# Altium schematic symbol library Resistor.SchLib: 1085 symbols (part 8 of 29)
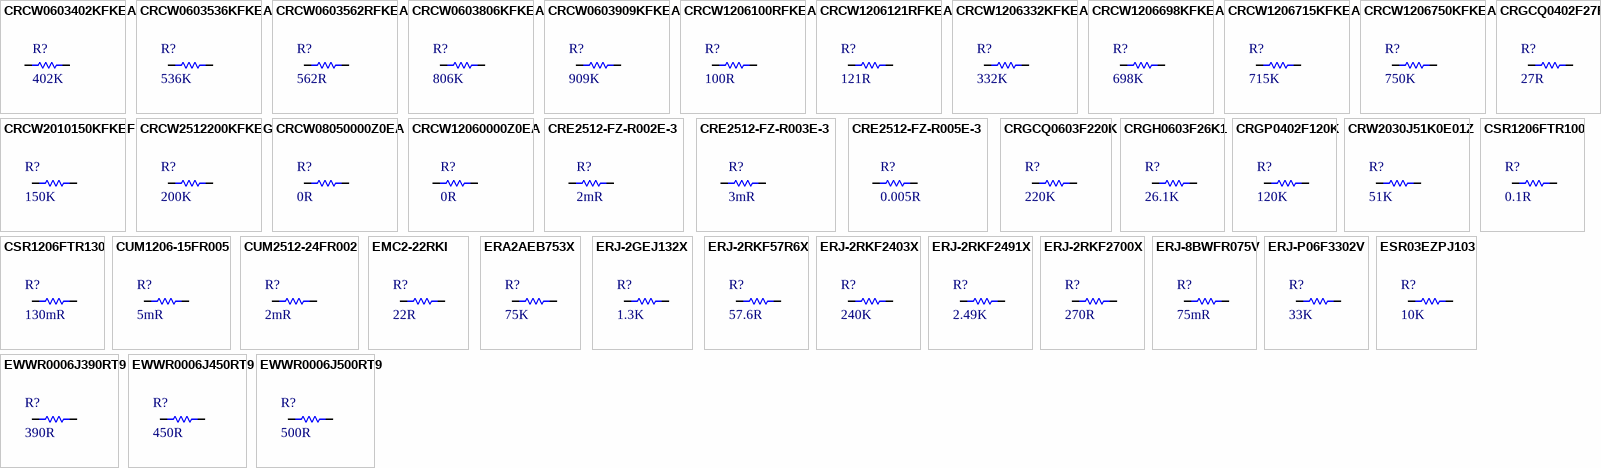
[diagram p34: symbols CRCW0603402KFKEA to EWWR0006J500RT9]

## CRCW2512200KFKEG
designator R?, comment 200K
RES SMD 200K OHM 1% 1W 2512; Manufacturer: Vishay Dale; Manufacturer Part Number: CRCW2512200KFKEG; Item Type: Resistors; Voltage Rating (DC): 500V; Supplier: Mouser; LCSC Part Number: C2078538; RoHS: Yes; Stock: 29311; Pricing: 1=0.3, 10=0.127, 50=0.127, 100=0.082, 1000=0.067, 10000=0.047 (USD); Lead Free: 5697LeadFree; ComponentLink1URL: https://datasheet.ciiva.com/16435/dcrcwe3-16435690.pdf?src-supplier=Future+Electronics; ComponentLink1Description: https://datasheet.ciiva.com/16435/dcrcwe3-16435690.pdf?src-supplier=Future+Electronics; ComponentLink2URL: https://datasheet.ciiva.com/5545/dcrcwe3-109170-5545692.pdf?src-supplier=Mouser; ComponentLink2Description: https://datasheet.ciiva.com/5545/dcrcwe3-109170-5545692.pdf?src-supplier=Mouser
footprint RES-2512
pins: 1, 2

## CRCW08050000Z0EA
designator R?, comment 0R
RES SMD 0 OHM JUMPER 1/8W 0805; Manufacturer: Vishay; Manufacturer Part Number: CRCW08050000Z0EA; Item Type: Resistors; Value: 0mR; Power Rating: 125mW; Voltage Rating: 150V; Tolerance: 1%; Temperature Coefficient: 100ppm/°C; Supplier: Mouser; LCSC Part Number: C844934; RoHS: Yes; Stock: 1461054; Pricing: 1=0.1, 10=0.023, 50=0.023, 100=0.014, 1000=0.012, 10000=0.005 (USD); Case/Package: 0805; Contact Plating: Tin; Weight: 0.000194oz; Case Code (Imperial): 0805; Case Code (Metric): 2012; Min Operating Temperature: -55°C; Max Operating Temperature: 155°C; Resistor Type: Thick Film; Packaging: Tape and Reel; Package Quantity: 1; Termination: SMD/SMT; Number of Terminations: 2; Max Power Dissipation: 125mW; Features: Automotive AEC-Q200; Series: CRCW; Construction: Rectangular; Technology: THICK FILM; Voltage Rating (DC): 150V; Resistance Tolerance: 1%; Length: 2mm; Width: 0.049inch; Height: 0.45mm; Depth: 1.25mm; Radiation Hardening: No; Lead Free: 5697LeadFree; RoHS Compliant: Yes; Military Standard: Not; Reach SVHC Compliant: Unknown; ComponentLink1URL: https://datasheet.ciiva.com/11811/0900766b80d98b26-11811304.pdf?src-supplier=Rs; ComponentLink1Description: https://datasheet.ciiva.com/11811/0900766b80d98b26-11811304.pdf?src-supplier=Rs; ComponentLink2URL: https://datasheet.ciiva.com/7841/1720486-7841839.pdf?src-supplier=Element14; ComponentLink2Description: https://datasheet.ciiva.com/7841/1720486-7841839.pdf?src-supplier=Element14; ComponentLink3URL: https://datasheet.ciiva.com/26314/fld-crcw-e3-data-en-26314630.pdf?src-supplier=Distrelec; ComponentLink3Description: https://datasheet.ciiva.com/26314/fld-crcw-e3-data-en-26314630.pdf?src-supplier=Distrelec; ComponentLink4URL: https://datasheet.ciiva.com/7841/1697337-7841629.pdf?src-supplier=Element14; ComponentLink4Description: https://datasheet.ciiva.com/7841/1697337-7841629.pdf?src-supplier=Element14; ComponentLink5URL: https://datasheet.ciiva.com/2463/dcrcwe3-2463038.pdf?src-supplier=Digikey; ComponentLink5Description: https://datasheet.ciiva.com/2463/dcrcwe3-2463038.pdf?src-supplier=Digikey; ComponentLink6URL: https://datasheet.ciiva.com/2463/dcrcwe3-2463039.pdf?src-supplier=Digikey; ComponentLink6Description: https://datasheet.ciiva.com/2463/dcrcwe3-2463039.pdf?src-supplier=Digikey; ComponentLink7URL: https://datasheet.ciiva.com/2463/dcrcwe3-2463037.pdf?src-supplier=Digikey; ComponentLink7Description: https://datasheet.ciiva.com/2463/dcrcwe3-2463037.pdf?src-supplier=Digikey; ComponentLink8URL: https://datasheet.ciiva.com/16719/70201119-16719706.pdf?src-supplier=Allied+Electronics; ComponentLink8Description: https://datasheet.ciiva.com/16719/70201119-16719706.pdf?src-supplier=Allied+Electronics; ComponentLink9URL: https://datasheet.ciiva.com/5543/dcrcwe3-109170-5543096.pdf?src-supplier=Mouser; ComponentLink9Description: https://datasheet.ciiva.com/5543/dcrcwe3-109170-5543096.pdf?src-supplier=Mouser; ComponentLink10URL: https://datasheet.ciiva.com/16389/dcrcwe3-16389338.pdf?src-supplier=Future+Electronics; ComponentLink10Description: https://datasheet.ciiva.com/16389/dcrcwe3-16389338.pdf?src-supplier=Future+Electronics
footprint RES-0805 (SMD 0805)
pins: 1, 2

## CRCW12060000Z0EA
designator R?, comment 0R
RES SMD 0 OHM JUMPER 1/4W 1206; Manufacturer: Vishay; Manufacturer Part Number: CRCW12060000Z0EA; Item Type: Resistor; Value: 0mR; Power Rating: 250mW; Voltage Rating: 200V; Temperature Coefficient: 100ppm/°C; Tolerance: 1%; Supplier: Mouser; LCSC Part Number: C190124; RoHS: Yes; Stock: 852938; Pricing: 1=0.1, 10=0.039, 50=0.039, 100=0.018, 1000=0.013, 10000=0.007 (USD); Case/Package: 1206; Weight: 0.000353oz; Case Code (Imperial): 1206; Case Code (Metric): 3216; Contact Plating: Tin; Min Operating Temperature: -55°C; Max Operating Temperature: 155°C; Resistor Type: Thick Film; Packaging: Tape and Reel; Package Quantity: 5000; Termination: SMD/SMT; Features: Automotive AEC-Q200; Series: CRCW; Max Power Dissipation: 250mW; Number of Terminations: 2; Technology: THICK FILM; Voltage Rating (DC): 200V; Construction: Rectangular; Length: 3.2mm; Width: 1.6mm; Height: 0.55mm; Depth: 1.6mm; Ratings: AEC-Q200; Radiation Hardening: No; RoHS Compliant: Yes; Lead Free: 5697LeadFree; Military Standard: Not; Reach SVHC Compliant: Unknown; ComponentLink1URL: https://datasheet.ciiva.com/7841/1720486-7841862.pdf?src-supplier=Element14; ComponentLink1Description: https://datasheet.ciiva.com/7841/1720486-7841862.pdf?src-supplier=Element14
footprint Res-1206
pins: 1, 2

## CRE2512-FZ-R002E-3
designator R?, comment 2mR
RES 0.002 OHM 1% 3W 2512; Manufacturer: Bourns; Manufacturer Part Number: CRE2512-FZ-R002E-3; Temperature Coefficient: 75ppm/°C; Item Type: Resistor; Supplier: Rs; Supplier Part Number: 2477148; RoHS: No; Category: Chip SMD Resistors; Stock: 7640; Pricing: 10=0.32, 100=0.28, 500=0.23, 1000=0.217, 2000=0.212 (GBP); Mounting Technology: Surface Mount; Case/Package: 2512; Case Code (Metric): 6432; Case Code (Imperial): 2512; Contact Plating: Tin; Min Operating Temperature: -55°C; Max Operating Temperature: 170°C; Value: 2mR; Power Rating: 3W; Tolerance: 1%; Packaging: Cut Tape; Resistor Type: Metal Alloy; Number of Terminations: 2; Termination: Solder; Max Power Dissipation: 3W; Features: Moisture Resistant,Automotive AEC-Q200; Series: CRE2512; Resistance Tolerance: 1%; Technology: METAL STRIP; Length: 0.254inch; Width: 0.132inch; Height: 0.035inch; Depth: 3.35mm; Ratings: AEC-Q200; Reach SVHC Compliant: No; ComponentLink1URL: https://datasheet.ciiva.com/46424/1838634-46424789.pdf?src-supplier=Element14; ComponentLink1Description: https://datasheet.ciiva.com/46424/1838634-46424789.pdf?src-supplier=Element14
footprint RES-2512
pins: 1, 2

## CRE2512-FZ-R003E-3
designator R?, comment 3mR
RES 0.003 OHM 1% 3W 2512; Manufacturer: Bourns; Manufacturer Part Number: CRE2512-FZ-R003E-3; Temperature Coefficient: 75ppm/°C; Item Type: Resistor; Supplier: Rs; Supplier Part Number: 2330765; RoHS: No; Category: Chip SMD Resistors; Stock: 5080; Pricing: 10=0.364, 50=0.325, 100=0.316, 500=0.307, 1000=0.3 (GBP); Mounting Technology: Surface Mount; Case/Package: 2512; Case Code (Metric): 6432; Case Code (Imperial): 2512; Contact Plating: Tin; Min Operating Temperature: -55°C; Max Operating Temperature: 170°C; Value: 3mR; Power Rating: 3W; Tolerance: 1%; Packaging: Cut Tape; Resistor Type: Metal Alloy; Number of Terminations: 2; Termination: Solder; Max Power Dissipation: 3W; Features: Moisture Resistant,Automotive AEC-Q200; Series: CRE2512; Resistance Tolerance: 1%; Technology: METAL STRIP; Length: 0.254inch; Width: 0.132inch; Height: 0.035inch; Depth: 3.35mm; Reach SVHC Compliant: No; RoHS Compliant: No; ComponentLink1URL: https://datasheet.ciiva.com/48532/cre-48532221.pdf?src-supplier=Avnet; ComponentLink1Description: https://datasheet.ciiva.com/48532/cre-48532221.pdf?src-supplier=Avnet; ComponentLink2URL: https://datasheet.ciiva.com/46424/1838634-46424792.pdf?src-supplier=Element14; ComponentLink2Description: https://datasheet.ciiva.com/46424/1838634-46424792.pdf?src-supplier=Element14; ComponentLink3URL: https://datasheet.ciiva.com/46424/1838634-46424793.pdf?src-supplier=Element14; ComponentLink3Description: https://datasheet.ciiva.com/46424/1838634-46424793.pdf?src-supplier=Element14
footprint RES-2512
pins: 1, 2

## CRE2512-FZ-R005E-3
designator R?, comment 0.005R
RES 0.005 OHM 1% 3W 2512; Manufacturer: Bourns; Manufacturer Part Number: CRE2512-FZ-R005E-3; Value: 5mR; Temperature Coefficient: 75ppm/°C; Item Type: Resistor; Supplier: Digikey; Supplier Part Number: CRE2512-FZ-R005E-3CT-ND; RoHS: No; Category: Chip SMD Resistors; Stock: 75916; Pricing: 1=0.73, 10=0.509, 25=0.4356, 50=0.3788, 100=0.2967, 250=0.27144, 500=0.22094, 1000=0.17524 (USD); Mounting Technology: Surface Mount; Case/Package: 2512; Case Code (Metric): 6432; Case Code (Imperial): 2512; Contact Plating: Tin; Min Operating Temperature: -55°C; Max Operating Temperature: 170°C; Power Rating: 3W; Tolerance: 1%; Packaging: Cut Tape; Resistor Type: Metal Alloy; Number of Terminations: 2; Termination: Solder; Max Power Dissipation: 3W; Features: Moisture Resistant,Automotive AEC-Q200; Series: CRE2512; Resistance Tolerance: 1%; Technology: METAL STRIP; Length: 0.254inch; Width: 0.132inch; Height: 0.035inch; Depth: 3.35mm; Reach SVHC Compliant: No; ComponentLink1URL: https://datasheet.ciiva.com/48532/cre-48532215.pdf?src-supplier=Avnet; ComponentLink1Description: https://datasheet.ciiva.com/48532/cre-48532215.pdf?src-supplier=Avnet
footprint RES-2512
pins: 1, 2

## CRGCQ0402F27R
designator R?, comment 27R
SMD Chip Resistor, 27 Ohm, ± 1%, 63 mW, 0402 [1005 Metric], Thick Film, General Purpose; Manufacturer: TE Connectivity; Manufacturer Part Number: CRGCQ0402F27R; Operating Supply Voltage: 50V; Power Rating: 62.5mW; Supplier: Digikey; Supplier Part Number: A129608CT-ND; RoHS: Yes; Category: Chip SMD Resistors; Stock: 81404; Pricing: 1=0.1, 10=0.02, 50=0.0126, 100=0.0105, 500=0.00708, 1000=0.00609, 5000=0.00442 (USD); Voltage Rating: 50V; Voltage Rating (DC): 50V; Height: 400um; ComponentLink1URL: http://datasheet.octopart.com/CRGCQ0402F27R-TE-Connectivity-datasheet-114679081.pdf?src-supplier=Farnell; ComponentLink1Description: http://datasheet.octopart.com/CRGCQ0402F27R-TE-Connectivity-datasheet-114679081.pdf?src-supplier=Farnell; ComponentLink2URL: http://datasheet.octopart.com/CRGCQ0402F27R-TE-Connectivity-datasheet-114679081.pdf?src-supplier=Mouser; ComponentLink2Description: http://datasheet.octopart.com/CRGCQ0402F27R-TE-Connectivity-datasheet-114679081.pdf?src-supplier=Mouser; ComponentLink3URL: http://datasheet.octopart.com/CRGCQ0402F27R-TE-Connectivity-datasheet-114679081.pdf?src-supplier=Avnet; ComponentLink3Description: http://datasheet.octopart.com/CRGCQ0402F27R-TE-Connectivity-datasheet-114679081.pdf?src-supplier=Avnet; ComponentLink4URL: https://www.te.com/commerce/DocumentDelivery/DDEController?Action=srchrtrv&amp;DocNm=1773204-3&amp;DocType=DS&amp;DocLang=English&src-supplier=Digikey; ComponentLink4Description: https://www.te.com/commerce/DocumentDelivery/DDEController?Action=srchrtrv&amp;DocNm=1773204-3&amp;DocType=DS&amp;DocLang=English&src-supplier=Digikey; ComponentLink5URL: http://datasheet.octopart.com/CRGCQ0402F27R-TE-Connectivity-datasheet-114679081.pdf?src-supplier=Digikey; ComponentLink5Description: http://datasheet.octopart.com/CRGCQ0402F27R-TE-Connectivity-datasheet-114679081.pdf?src-supplier=Digikey; ComponentLink6URL: http://datasheet.octopart.com/CRGCQ0402F27R-TE-Connectivity-datasheet-114679081.pdf?src-supplier=Newark; ComponentLink6Description: http://datasheet.octopart.com/CRGCQ0402F27R-TE-Connectivity-datasheet-114679081.pdf?src-supplier=Newark; ComponentLink7URL: http://datasheet.octopart.com/CRGCQ0402F27R-TE-Connectivity-datasheet-114679081.pdf?src-supplier=Verical; ComponentLink7Description: http://datasheet.octopart.com/CRGCQ0402F27R-TE-Connectivity-datasheet-114679081.pdf?src-supplier=Verical; ComponentLink8URL: http://datasheet.octopart.com/CRGCQ0402F27R-TE-Connectivity-datasheet-114679081.pdf?src-supplier=Arrow+Electronics; ComponentLink8Description: http://datasheet.octopart.com/CRGCQ0402F27R-TE-Connectivity-datasheet-114679081.pdf?src-supplier=Arrow+Electronics; ComponentLink9URL: http://datasheet.octopart.com/CRGCQ0402F27R-TE-Connectivity-datasheet-114679081.pdf?src-supplier=Onlinecomponents.com; ComponentLink9Description: http://datasheet.octopart.com/CRGCQ0402F27R-TE-Connectivity-datasheet-114679081.pdf?src-supplier=Onlinecomponents.com; ComponentLink10URL: http://datasheet.octopart.com/CRGCQ0402F27R-TE-Connectivity-datasheet-114679081.pdf?src-supplier=Sager+Electronics; ComponentLink10Description: http://datasheet.octopart.com/CRGCQ0402F27R-TE-Connectivity-datasheet-114679081.pdf?src-supplier=Sager+Electronics; ComponentLink11URL: http://datasheet.octopart.com/CRGCQ0402F27R-TE-Connectivity-datasheet-114679081.pdf?src-supplier=Electro+Sonic; ComponentLink11Description: http://datasheet.octopart.com/CRGCQ0402F27R-TE-Connectivity-datasheet-114679081.pdf?src-supplier=Electro+Sonic; ComponentLink12URL: http://datasheet.octopart.com/CRGCQ0402F27R-TE-Connectivity-datasheet-114679081.pdf?src-supplier=Heilind+Electronics; ComponentLink12Description: http://datasheet.octopart.com/CRGCQ0402F27R-TE-Connectivity-datasheet-114679081.pdf?src-supplier=Heilind+Electronics; ComponentLink13URL: http://datasheet.octopart.com/CRGCQ0402F27R-TE-Connectivity-datasheet-114679081.pdf?src-supplier=Interstate+Connecting+Components; ComponentLink13Description: http://datasheet.octopart.com/CRGCQ0402F27R-TE-Connectivity-datasheet-114679081.pdf?src-supplier=Interstate+Connecting+Components; ComponentLink14URL: https://datasheet.octopart.com/CRGCQ0402F27R-TE-Connectivity-datasheet-114679081.pdf?src-supplier=Master+Electronics; ComponentLink14Description: https://datasheet.octopart.com/CRGCQ0402F27R-TE-Connectivity-datasheet-114679081.pdf?src-supplier=Master+Electronics; ComponentLink15URL: http://datasheet.octopart.com/CRGCQ0402F27R-TE-Connectivity-datasheet-114679081.pdf?src-supplier=TME; ComponentLink15Description: http://datasheet.octopart.com/CRGCQ0402F27R-TE-Connectivity-datasheet-114679081.pdf?src-supplier=TME
footprint Res-0402
pins: 1, 2

## CRGCQ0603F220K
designator R?, comment 220K
RES 220K OHM 1% 1/10W 0603; Manufacturer: TE Connectivity; Manufacturer Part Number: CRGCQ0603F220K; Power Rating: 100mW; Voltage Rating: 75V; Item Type: Resistor; Supplier: Avnet; Supplier Part Number: 73AC9080; RoHS: Yes; Category: Chip SMD Resistors; Stock: 4740; Pricing: 1=0.006 (USD); Voltage Rating (DC): 75V; Height: 550um; ComponentLink1URL: http://datasheet.octopart.com/CRGCQ0603F220K-TE-Connectivity-datasheet-114679081.pdf?src-supplier=Newark; ComponentLink1Description: http://datasheet.octopart.com/CRGCQ0603F220K-TE-Connectivity-datasheet-114679081.pdf?src-supplier=Newark; ComponentLink2URL: http://datasheet.octopart.com/CRGCQ0603F220K-TE-Connectivity-datasheet-114679081.pdf?src-supplier=Verical; ComponentLink2Description: http://datasheet.octopart.com/CRGCQ0603F220K-TE-Connectivity-datasheet-114679081.pdf?src-supplier=Verical; ComponentLink3URL: http://datasheet.octopart.com/CRGCQ0603F220K-TE-Connectivity-datasheet-114679081.pdf?src-supplier=Digi-Key; ComponentLink3Description: http://datasheet.octopart.com/CRGCQ0603F220K-TE-Connectivity-datasheet-114679081.pdf?src-supplier=Digi-Key; ComponentLink4URL: https://www.te.com/commerce/DocumentDelivery/DDEController?Action=srchrtrv&amp;DocNm=1773204-3&amp;DocType=DS&amp;DocLang=English&src-supplier=Digi-Key; ComponentLink4Description: https://www.te.com/commerce/DocumentDelivery/DDEController?Action=srchrtrv&amp;DocNm=1773204-3&amp;DocType=DS&amp;DocLang=English&src-supplier=Digi-Key; ComponentLink5URL: http://datasheet.octopart.com/CRGCQ0603F220K-TE-Connectivity-datasheet-114679081.pdf?src-supplier=Avnet; ComponentLink5Description: http://datasheet.octopart.com/CRGCQ0603F220K-TE-Connectivity-datasheet-114679081.pdf?src-supplier=Avnet; ComponentLink6URL: https://4donline.ihs.com/images/VipMasterIC/IC/TYEL/TYEL-S-A0004929575/TYEL-S-A0004929575-1.pdf?hkey=52A5661711E402568146F3353EA87419&src-supplier=Farnell; ComponentLink6Description: https://4donline.ihs.com/images/VipMasterIC/IC/TYEL/TYEL-S-A0004929575/TYEL-S-A0004929575-1.pdf?hkey=52A5661711E402568146F3353EA87419&src-supplier=Farnell; ComponentLink7URL: http://datasheet.octopart.com/CRGCQ0603F220K-TE-Connectivity-datasheet-114679081.pdf?src-supplier=Mouser; ComponentLink7Description: http://datasheet.octopart.com/CRGCQ0603F220K-TE-Connectivity-datasheet-114679081.pdf?src-supplier=Mouser; ComponentLink8URL: https://4donline.ihs.com/images/VipMasterIC/IC/TYEL/TYEL-S-A0004929575/TYEL-S-A0004929575-1.pdf?hkey=52A5661711E402568146F3353EA87419&src-supplier=Newark; ComponentLink8Description: https://4donline.ihs.com/images/VipMasterIC/IC/TYEL/TYEL-S-A0004929575/TYEL-S-A0004929575-1.pdf?hkey=52A5661711E402568146F3353EA87419&src-supplier=Newark; ComponentLink9URL: https://datasheet.octopart.com/5-2176339-3-TE-Connectivity-datasheet-167977702.pdf?src-supplier=Future+Electronics; ComponentLink9Description: https://datasheet.octopart.com/5-2176339-3-TE-Connectivity-datasheet-167977702.pdf?src-supplier=Future+Electronics; ComponentLink10URL: http://datasheet.octopart.com/CRGCQ0603F220K-TE-Connectivity-datasheet-114679081.pdf?src-supplier=Onlinecomponents.com; ComponentLink10Description: http://datasheet.octopart.com/CRGCQ0603F220K-TE-Connectivity-datasheet-114679081.pdf?src-supplier=Onlinecomponents.com; ComponentLink11URL: https://datasheet.octopart.com/CRGCQ0603F220K-TE-Connectivity-datasheet-114679081.pdf?src-supplier=Master+Electronics; ComponentLink11Description: https://datasheet.octopart.com/CRGCQ0603F220K-TE-Connectivity-datasheet-114679081.pdf?src-supplier=Master+Electronics; ComponentLink12URL: http://datasheet.octopart.com/CRGCQ0603F220K-TE-Connectivity-datasheet-114679081.pdf?src-supplier=TME; ComponentLink12Description: http://datasheet.octopart.com/CRGCQ0603F220K-TE-Connectivity-datasheet-114679081.pdf?src-supplier=TME; ComponentLink13URL: http://datasheet.octopart.com/CRGCQ0603F220K-TE-Connectivity-datasheet-114679081.pdf?src-supplier=Sager+Electronics; ComponentLink13Description: http://datasheet.octopart.com/CRGCQ0603F220K-TE-Connectivity-datasheet-114679081.pdf?src-supplier=Sager+Electronics; ComponentLink14URL: http://datasheet.octopart.com/CRGCQ0603F220K-TE-Connectivity-datasheet-114679081.pdf?src-supplier=Heilind+Electronics; ComponentLink14Description: http://datasheet.octopart.com/CRGCQ0603F220K-TE-Connectivity-datasheet-114679081.pdf?src-supplier=Heilind+Electronics; ComponentLink15URL: http://datasheet.octopart.com/CRGCQ0603F220K-TE-Connectivity-datasheet-114679081.pdf?src-supplier=Electro+Sonic; ComponentLink15Description: http://datasheet.octopart.com/CRGCQ0603F220K-TE-Connectivity-datasheet-114679081.pdf?src-supplier=Electro+Sonic; ComponentLink16URL: http://datasheet.octopart.com/CRGCQ0603F220K-TE-Connectivity-datasheet-114679081.pdf?src-supplier=Interstate+Connecting+Components; ComponentLink16Description: http://datasheet.octopart.com/CRGCQ0603F220K-TE-Connectivity-datasheet-114679081.pdf?src-supplier=Interstate+Connecting+Components; LCSC Part Number: C4282892
footprint Res-0603
pins: 1, 2

## CRGH0603F26K1
designator R?, comment 26.1K
RES SMD 26.1K OHM 1% 1/5W 0603; Manufacturer: TE Connectivity; Manufacturer Part Number: CRGH0603F26K1; Item Type: Resistor; Value: 26.1kR; Temperature Coefficient: 100ppm/°C; Max Power Dissipation: 200mW; Voltage Rating: 50V; Number of Resistors: 1; Supplier: Digikey; LCSC Part Number: C4086912; RoHS: Yes; Pricing: 20000=0.00865 (USD); Mounting Technology: Surface Mount; Case/Package: 0603; Case Code (Imperial): 0603; Case Code (Metric): 1608; Min Operating Temperature: -55°C; Max Operating Temperature: 155°C; Tolerance: 1%; Packaging: Tape and Reel; Number of Terminations: 2; Series: CRGH, Neohm; Power Rating: 200mW; Resistor Type: Thick Film,Power resistor; Termination: Solder; Length: 1.6mm; Width: 0.8mm; Height: 0.45mm; RoHS Compliant: Yes; ELV: Compliant; ComponentLink1URL: http://www.mouser.com/ds/2/418/NG_DS_1773204-1_C-717624.pdf?src-supplier=Mouser; ComponentLink1Description: http://www.mouser.com/ds/2/418/NG_DS_1773204-1_C-717624.pdf?src-supplier=Mouser; ComponentLink2URL: https://www.te.com/commerce/DocumentDelivery/DDEController?Action=srchrtrv&amp;DocNm=1773204-1&amp;DocType=DS&amp;DocLang=English&src-supplier=Digikey; ComponentLink2Description: https://www.te.com/commerce/DocumentDelivery/DDEController?Action=srchrtrv&amp;DocNm=1773204-1&amp;DocType=DS&amp;DocLang=English&src-supplier=Digikey
footprint Res-0603
pins: 1, 2

## CRGP0402F120K
designator R?, comment 120K
CRGP 0402 120K 1%; Manufacturer: TE Connectivity; Manufacturer Part Number: CRGP0402F120K; Supplier 1: Digi-Key; Stock 1: 98708; Pricing 1: 1=0.1, 10=0.092, 100=0.0355, 1000=0.01563, 2500=0.0135, 5000=0.01208 (USD); RoHS Compliant: Yes; Supplier Part Number 1: A130380CT-ND; LCSC Part Number: C4133953
footprint Res-0402
pins: 1, 2

## CRW2030J51K0E01Z
designator R?, comment 51K
3W Thick Film Resistors ±100ppm/℃ ±5% 51kΩ 2030 Chip Resistor - Surface Mount ROHS; Manufacturer: Ever Ohms Tech; Manufacturer Part Number: CRW2030J51K0E01Z; Package: 2030; LCSC Part Number: C175634; Item Type: Resistor; ComponentLink1Description: LCSC; ComponentLink1URL: https://www.lcsc.com/product-detail/Chip-Resistor-Surface-Mount_Ever-Ohms-Tech-CRW2030J51K0E01Z_C175634.html
footprint Res-2030
pins: 1, 2

## CSR1206FTR100
designator R?, comment 0.1R
Res Thick Film 1206 0.1 Ohm 1% 1/2W ±100ppm/°C Molded SMD SMD Paper T/R; Manufacturer: Stackpole Electronics; Manufacturer Part Number: CSR1206FTR100; Item Type: Resistor; Value: 100mR; Max Power Dissipation: 500mW; Supplier: Digikey; LCSC Part Number: C346763; RoHS: Yes; Stock: 291710; Pricing: 1=0.36, 10=0.265, 25=0.212, 50=0.1576, 100=0.1111, 250=0.09896, 500=0.08484, 1000=0.06464 (USD); Mounting Technology: Surface Mount; Case/Package: 1206; Case Code (Metric): 3216; Case Code (Imperial): 1206; Contact Plating: Tin,Matte; Min Operating Temperature: -55°C; Max Operating Temperature: 155°C; Packaging: Tape and Reel; Tolerance: 1%; Package Quantity: 1; Number of Terminations: 2; Temperature Coefficient: 100ppm/°C; Series: CSR; Construction: Rectangular; Length: 0.12inch; Width: 0.061inch; Height: 0.026inch; Depth: 1.55mm; Radiation Hardening: No; Lead Free: Lead Free; Military Standard: Not; RoHS Compliant: Yes; ComponentLink1URL: https://datasheet.ciiva.com/26835/getdatasheetpartid-743581-26835493.pdf?src-supplier=Verical; ComponentLink1Description: https://datasheet.ciiva.com/26835/getdatasheetpartid-743581-26835493.pdf?src-supplier=Verical
footprint Res-1206
pins: 1, 2

## CSR1206FTR130
designator R?, comment 130mR
500mW Thick Film Resistors ±100ppm/℃ ±1% 130mΩ 1206 Chip Resistor - Surface Mount ROHS; Manufacturer: SEI(Stackpole Elec); Manufacturer Part Number: CSR1206FTR130; Package: 1206; LCSC Part Number: C346779; Item Type: Resistor; ComponentLink1Description: LCSC; ComponentLink1URL: https://www.lcsc.com/product-detail/Chip-Resistor-Surface-Mount_SEI-Stackpole-Elec-CSR1206FTR130_C346779.html
footprint Res-1206
pins: 1, 2

## CUM1206-15FR005
designator R?, comment 5mR
1W 5mΩ ±1% 1206 Current Sense Resistors/Shunt Resistors ROHS; Manufacturer: FORT; Manufacturer Part Number: CUM1206-15FR005; Package: 1206; LCSC Part Number: C5185588; Item Type: Resistor; ComponentLink1Description: LCSC; ComponentLink1URL: https://www.lcsc.com/product-detail/Current-Sense-Resistors-Shunt-Resistors_FORT-CUM1206-15FR005_C5185588.html
footprint Res-1206
pins: 1, 2

## CUM2512-24FR002
designator R?, comment 2mR
2W 2mΩ ±50ppm/℃ ±1% 2512 Current Sense Resistors / Shunt Resistors ROHS; Manufacturer: FORT; Manufacturer Part Number: CUM2512-24FR002; Package: 2512; LCSC Part Number: C323765; Item Type: Resistor; ComponentLink1Description: LCSC; ComponentLink1URL: https://www.lcsc.com/product-detail/Current-Sense-Resistors-Shunt-Resistors_FORT-CUM2512-24FR002_C323765.html
footprint RES-2512
pins: 1, 2

## EMC2-22RKI
designator R?, comment 22R
Res Metal Film 22 Ohm 10% 2W ±100ppm/C Conformal Coated AXL Ammo; Manufacturer: TT Welwyn; Manufacturer Part Number: EMC2-22RKI; Item Type: Resistor; Voltage Rating: 500V; Temperature Coefficient: 100ppm/°C; Lead Length: 27mm; Supplier: Arrow Electronics; Supplier Part Number: EMC2-22RKI; RoHS: Yes; Stock: 48000; Pricing: 2000=0.137, 10000=0.1282, 24000=0.1271, 50000=0.1192 (USD); Case/Package: Axial; Min Operating Temperature: -55°C; Max Operating Temperature: 155°C; Package Quantity: 1; Value: 22R; Power Rating: 2W; Tolerance: 10%; Packaging: Cut Tape; Resistor Type: Metal Film; Number of Terminations: 2; Max Power Dissipation: 2W; Voltage Rating (DC): 500V; Series: EMC; Resistance Tolerance: 10%; Length: 0.394inch; Reach SVHC Compliant: No; RoHS Compliant: Yes; ComponentLink1URL: https://datasheet.ciiva.com/2717/emc-2717106.pdf?src-supplier=Digikey; ComponentLink1Description: https://datasheet.ciiva.com/2717/emc-2717106.pdf?src-supplier=Digikey; ComponentLink2URL: https://datasheet.ciiva.com/2717/emc-2717107.pdf?src-supplier=Digikey; ComponentLink2Description: https://datasheet.ciiva.com/2717/emc-2717107.pdf?src-supplier=Digikey
footprint EMC2-22RKI
pins: 1, 2

## ERA2AEB753X
designator R?, comment 75K
RES SMD 75K OHM 0.1% 1/16W 0402; Manufacturer: Panasonic; Manufacturer Part Number: ERA-2AEB753X; Item Type: Resistors; Voltage Rating (DC): 25V; Supplier: Mouser; LCSC Part Number: C543617; RoHS: Yes; Stock: 21475; Pricing: 1=0.18, 10=0.102, 50=0.102, 100=0.091, 1000=0.061, 10000=0.051 (USD); Lead Free: 5697LeadFree; ComponentLink1URL: https://datasheet.ciiva.com/43470/1776116-43470511.pdf?src-supplier=Farnell; ComponentLink1Description: https://datasheet.ciiva.com/43470/1776116-43470511.pdf?src-supplier=Farnell; ComponentLink2URL: https://datasheet.ciiva.com/9187/aoa0000ce26-9187750.pdf?src-supplier=Avnet; ComponentLink2Description: https://datasheet.ciiva.com/9187/aoa0000ce26-9187750.pdf?src-supplier=Avnet; ComponentLink3URL: https://datasheet.ciiva.com/24161/aoa0000ce26-197354-24161688.pdf?src-supplier=Mouser; ComponentLink3Description: https://datasheet.ciiva.com/24161/aoa0000ce26-197354-24161688.pdf?src-supplier=Mouser
footprint Res-0402
pins: 1, 2

## ERJ-2GEJ132X
designator R?, comment 1.3K
RES SMD 1.3K OHM 5% 1/10W 0402; Manufacturer: Panasonic; Manufacturer Part Number: ERJ-2GEJ132X; Item Type: Resistors; Voltage Rating (DC): 50V; Supplier: Mouser; LCSC Part Number: C412993; RoHS: Yes; Stock: 74469; Pricing: 1=0.1, 10=0.014, 50=0.014, 100=0.008, 1000=0.007, 10000=0.003 (USD); Lead Free: 5697LeadFree; ComponentLink1URL: https://datasheet.ciiva.com/11821/0900766b80f806dd-11821236.pdf?src-supplier=Rs; ComponentLink1Description: https://datasheet.ciiva.com/11821/0900766b80f806dd-11821236.pdf?src-supplier=Rs; ComponentLink2URL: https://datasheet.ciiva.com/43470/1678796-43470023.pdf?src-supplier=Farnell; ComponentLink2Description: https://datasheet.ciiva.com/43470/1678796-43470023.pdf?src-supplier=Farnell; ComponentLink3URL: https://datasheet.ciiva.com/9118/aoa0000ce1-9118999.pdf?src-supplier=Avnet; ComponentLink3Description: https://datasheet.ciiva.com/9118/aoa0000ce1-9118999.pdf?src-supplier=Avnet; ComponentLink4URL: https://datasheet.ciiva.com/30079/4aoa0000ce1-30079896.pdf?src-supplier=Onlinecomponents.com; ComponentLink4Description: https://datasheet.ciiva.com/30079/4aoa0000ce1-30079896.pdf?src-supplier=Onlinecomponents.com
footprint Res-0402
pins: 1, 2

## ERJ-2RKF57R6X
designator R?, comment 57.6R
RES SMD 57.6 OHM 1% 1/10W 0402; Manufacturer: Panasonic; Manufacturer Part Number: ERJ-2RKF57R6X; Item Type: Resistors; Supplier: Mouser; Supplier Part Number: 667-ERJ-2RKF57R6X; RoHS: Yes; Stock: 32931; Pricing: 1=0.1, 10=0.015, 50=0.015, 100=0.009, 1000=0.006, 10000=0.003 (USD); ComponentLink1URL: https://datasheet.ciiva.com/9188/aoa0000ce2-9188571.pdf?src-supplier=Avnet; ComponentLink1Description: https://datasheet.ciiva.com/9188/aoa0000ce2-9188571.pdf?src-supplier=Avnet; ComponentLink2URL: https://datasheet.ciiva.com/9188/aoa0000ce2-9188574.pdf?src-supplier=Avnet; ComponentLink2Description: https://datasheet.ciiva.com/9188/aoa0000ce2-9188574.pdf?src-supplier=Avnet; ComponentLink3URL: https://datasheet.ciiva.com/24026/aoa0000ce2-24026248.pdf?src-supplier=Mouser; ComponentLink3Description: https://datasheet.ciiva.com/24026/aoa0000ce2-24026248.pdf?src-supplier=Mouser; ComponentLink4URL: https://datasheet.ciiva.com/43467/1678782-43467198.pdf?src-supplier=Farnell; ComponentLink4Description: https://datasheet.ciiva.com/43467/1678782-43467198.pdf?src-supplier=Farnell; ComponentLink5URL: https://datasheet.ciiva.com/46372/1678782-46372935.pdf?src-supplier=Element14; ComponentLink5Description: https://datasheet.ciiva.com/46372/1678782-46372935.pdf?src-supplier=Element14; ComponentLink6URL: https://datasheet.ciiva.com/46372/1678782-46372936.pdf?src-supplier=Element14; ComponentLink6Description: https://datasheet.ciiva.com/46372/1678782-46372936.pdf?src-supplier=Element14; ComponentLink7URL: https://datasheet.ciiva.com/22668/1678782-22668391.pdf?src-supplier=Element14; ComponentLink7Description: https://datasheet.ciiva.com/22668/1678782-22668391.pdf?src-supplier=Element14; ComponentLink8URL: https://datasheet.ciiva.com/22743/1678782-22743894.pdf?src-supplier=Element14; ComponentLink8Description: https://datasheet.ciiva.com/22743/1678782-22743894.pdf?src-supplier=Element14; ComponentLink9URL: https://datasheet.ciiva.com/30107/aoa0000ce2-30107676.pdf?src-supplier=Onlinecomponents.com; ComponentLink9Description: https://datasheet.ciiva.com/30107/aoa0000ce2-30107676.pdf?src-supplier=Onlinecomponents.com; LCSC Part Number: C3025671
footprint Res-0402
pins: 1, 2

## ERJ-2RKF2403X
designator R?, comment 240K
RES SMD 240K OHM 1% 1/10W 0402; Manufacturer: Panasonic; Manufacturer Part Number: ERJ-2RKF2403X; Item Type: Resistors; Voltage Rating (DC): 50V; Supplier: Mouser; LCSC Part Number: C413113; RoHS: Yes; Stock: 35994; Pricing: 1=0.1, 10=0.015, 50=0.015, 100=0.009, 1000=0.008, 10000=0.004 (USD); ComponentLink1URL: https://datasheet.ciiva.com/11821/0900766b80f80784-11821249.pdf?src-supplier=Rs; ComponentLink1Description: https://datasheet.ciiva.com/11821/0900766b80f80784-11821249.pdf?src-supplier=Rs; ComponentLink2URL: https://datasheet.ciiva.com/9119/aoa0000ce2-9119256.pdf?src-supplier=Avnet; ComponentLink2Description: https://datasheet.ciiva.com/9119/aoa0000ce2-9119256.pdf?src-supplier=Avnet; ComponentLink3URL: https://datasheet.ciiva.com/9119/aoa0000ce2-9119253.pdf?src-supplier=Avnet; ComponentLink3Description: https://datasheet.ciiva.com/9119/aoa0000ce2-9119253.pdf?src-supplier=Avnet
footprint Res-0402
pins: 1, 2

## ERJ-2RKF2491X
designator R?, comment 2.49K
RES SMD 2.49K OHM 1% 1/10W 0402; Manufacturer: Panasonic; Manufacturer Part Number: ERJ-2RKF2491X; Item Type: Resistors; Voltage Rating (DC): 50V; Supplier: Mouser; LCSC Part Number: C2076828; RoHS: Yes; Stock: 56276; Pricing: 1=0.1, 10=0.016, 50=0.016, 100=0.009, 1000=0.008, 10000=0.004 (USD); Pins: 2NUMBER; Lead Free: 5697LeadFree; ComponentLink1URL: https://datasheet.ciiva.com/24024/aoa0000ce2-24024651.pdf?src-supplier=Mouser; ComponentLink1Description: https://datasheet.ciiva.com/24024/aoa0000ce2-24024651.pdf?src-supplier=Mouser; ComponentLink2URL: https://datasheet.ciiva.com/5969/426256-5969210.pdf?src-supplier=Farnell; ComponentLink2Description: https://datasheet.ciiva.com/5969/426256-5969210.pdf?src-supplier=Farnell; ComponentLink3URL: https://datasheet.ciiva.com/43460/426256-43460300.pdf?src-supplier=Farnell; ComponentLink3Description: https://datasheet.ciiva.com/43460/426256-43460300.pdf?src-supplier=Farnell; ComponentLink4URL: https://datasheet.ciiva.com/9197/aoa0000ce2-9197019.pdf?src-supplier=Avnet; ComponentLink4Description: https://datasheet.ciiva.com/9197/aoa0000ce2-9197019.pdf?src-supplier=Avnet; ComponentLink5URL: https://datasheet.ciiva.com/28548/1678782-28548269.pdf?src-supplier=Element14; ComponentLink5Description: https://datasheet.ciiva.com/28548/1678782-28548269.pdf?src-supplier=Element14; ComponentLink6URL: https://datasheet.ciiva.com/28694/1678782-28694207.pdf?src-supplier=Element14; ComponentLink6Description: https://datasheet.ciiva.com/28694/1678782-28694207.pdf?src-supplier=Element14; ComponentLink7URL: https://datasheet.ciiva.com/46388/426256-46388155.pdf?src-supplier=Element14; ComponentLink7Description: https://datasheet.ciiva.com/46388/426256-46388155.pdf?src-supplier=Element14
footprint Res-0402
pins: 1, 2

## ERJ-2RKF2700X
designator R?, comment 270R
RES SMD 270 OHM 1% 1/10W 0402; Manufacturer: Panasonic; Manufacturer Part Number: ERJ-2RKF2700X; Item Type: Resistors; Voltage Rating (DC): 50V; Supplier: Mouser; LCSC Part Number: C278588; RoHS: Yes; Stock: 141131; Pricing: 1=0.1, 10=0.015, 50=0.015, 100=0.009, 1000=0.008, 10000=0.004 (USD); Lead Free: 5697LeadFree; ComponentLink1URL: https://datasheet.ciiva.com/11821/0900766b80f80784-11821240.pdf?src-supplier=Rs; ComponentLink1Description: https://datasheet.ciiva.com/11821/0900766b80f80784-11821240.pdf?src-supplier=Rs; ComponentLink2URL: https://datasheet.ciiva.com/46373/1678782-46373915.pdf?src-supplier=Element14; ComponentLink2Description: https://datasheet.ciiva.com/46373/1678782-46373915.pdf?src-supplier=Element14; ComponentLink3URL: https://datasheet.ciiva.com/46373/1678782-46373916.pdf?src-supplier=Element14; ComponentLink3Description: https://datasheet.ciiva.com/46373/1678782-46373916.pdf?src-supplier=Element14; ComponentLink4URL: https://datasheet.ciiva.com/16767/70260748-16767359.pdf?src-supplier=Allied+Electronics; ComponentLink4Description: https://datasheet.ciiva.com/16767/70260748-16767359.pdf?src-supplier=Allied+Electronics; ComponentLink5URL: https://datasheet.ciiva.com/7944/aoa0000ce2-7944940.pdf?src-supplier=Element14; ComponentLink5Description: https://datasheet.ciiva.com/7944/aoa0000ce2-7944940.pdf?src-supplier=Element14; ComponentLink6URL: https://datasheet.ciiva.com/22705/1678782-22705421.pdf?src-supplier=Element14; ComponentLink6Description: https://datasheet.ciiva.com/22705/1678782-22705421.pdf?src-supplier=Element14; ComponentLink7URL: https://datasheet.ciiva.com/7944/aoa0000ce2-7944606.pdf?src-supplier=Element14; ComponentLink7Description: https://datasheet.ciiva.com/7944/aoa0000ce2-7944606.pdf?src-supplier=Element14; ComponentLink8URL: https://datasheet.ciiva.com/24069/aoa0000ce2-24069133.pdf?src-supplier=Mouser; ComponentLink8Description: https://datasheet.ciiva.com/24069/aoa0000ce2-24069133.pdf?src-supplier=Mouser; ComponentLink9URL: https://datasheet.ciiva.com/9183/aoa0000ce2-9183598.pdf?src-supplier=Avnet; ComponentLink9Description: https://datasheet.ciiva.com/9183/aoa0000ce2-9183598.pdf?src-supplier=Avnet; ComponentLink10URL: https://datasheet.ciiva.com/43467/1678782-43467257.pdf?src-supplier=Farnell; ComponentLink10Description: https://datasheet.ciiva.com/43467/1678782-43467257.pdf?src-supplier=Farnell; ComponentLink11URL: https://datasheet.ciiva.com/5860/aoa0000ce2-5860650.pdf?src-supplier=Farnell; ComponentLink11Description: https://datasheet.ciiva.com/5860/aoa0000ce2-5860650.pdf?src-supplier=Farnell; ComponentLink12URL: https://datasheet.ciiva.com/9183/aoa0000ce2-9183566.pdf?src-supplier=Avnet; ComponentLink12Description: https://datasheet.ciiva.com/9183/aoa0000ce2-9183566.pdf?src-supplier=Avnet; ComponentLink13URL: https://datasheet.ciiva.com/16766/70260748-16766103.pdf?src-supplier=Allied+Electronics; ComponentLink13Description: https://datasheet.ciiva.com/16766/70260748-16766103.pdf?src-supplier=Allied+Electronics; ComponentLink14URL: https://datasheet.ciiva.com/30198/aoa0000ce2-30198389.pdf?src-supplier=Onlinecomponents.com; ComponentLink14Description: https://datasheet.ciiva.com/30198/aoa0000ce2-30198389.pdf?src-supplier=Onlinecomponents.com
footprint Res-0402
pins: 1, 2

## ERJ-8BWFR075V
designator R?, comment 75mR
RES 0.075 OHM 1% 1W 1206; Manufacturer: Panasonic; Manufacturer Part Number: ERJ-8BWFR075V; Temperature Coefficient: 100ppm/°C; Item Type: Resistor Current Sense; Supplier: Mouser; Supplier Part Number: 667-ERJ-8BWFR075V; RoHS: Yes; Category: Chip SMD Resistors; Stock: 148; Pricing: 1=0.72, 10=0.385, 50=0.385, 100=0.337, 1000=0.215, 10000=0.178 (USD); Mounting Technology: Surface Mount; Case/Package: 1206; Pins: 2; Case Code (Metric): 3216; Case Code (Imperial): 1206; Contact Plating: Tin; Min Operating Temperature: -55°C; Max Operating Temperature: 155°C; Tolerance: 1%; Power Rating: 1W; Value: 75mR; Packaging: Tape and Reel; Package Quantity: 5000; Resistor Type: Thick Film; Number of Terminations: 2; Termination: SMD/SMT; Max Power Dissipation: 1W; Features: Automotive AEC-Q200; Series: ERJ; Technology: THICK FILM; Resistance Tolerance: 1%; Length: 3.2mm; Width: 1.6mm; Height: 0.65mm; Depth: 1.6mm; Ratings: AEC-Q200; Lead Free: Lead Free; ComponentLink1URL: https://datasheet.ciiva.com/11810/0900766b8126441d-11810144.pdf?src-supplier=Rs; ComponentLink1Description: https://datasheet.ciiva.com/11810/0900766b8126441d-11810144.pdf?src-supplier=Rs; ComponentLink2URL: https://datasheet.ciiva.com/5901/1662788-5901709.pdf?src-supplier=Farnell; ComponentLink2Description: https://datasheet.ciiva.com/5901/1662788-5901709.pdf?src-supplier=Farnell; ComponentLink3URL: https://datasheet.ciiva.com/7943/1662788-7943643.pdf?src-supplier=Element14; ComponentLink3Description: https://datasheet.ciiva.com/7943/1662788-7943643.pdf?src-supplier=Element14; ComponentLink4URL: https://datasheet.ciiva.com/5901/1662788-5901708.pdf?src-supplier=Farnell; ComponentLink4Description: https://datasheet.ciiva.com/5901/1662788-5901708.pdf?src-supplier=Farnell; ComponentLink5URL: https://datasheet.ciiva.com/24025/aoa0000ce3-72189-24025850.pdf?src-supplier=Mouser; ComponentLink5Description: https://datasheet.ciiva.com/24025/aoa0000ce3-72189-24025850.pdf?src-supplier=Mouser; ComponentLink6URL: https://datasheet.ciiva.com/9187/aoa0000ce3-9187670.pdf?src-supplier=Avnet; ComponentLink6Description: https://datasheet.ciiva.com/9187/aoa0000ce3-9187670.pdf?src-supplier=Avnet; ComponentLink7URL: https://datasheet.ciiva.com/30147/6aoa0000ce3-30147930.pdf?src-supplier=Onlinecomponents.com; ComponentLink7Description: https://datasheet.ciiva.com/30147/6aoa0000ce3-30147930.pdf?src-supplier=Onlinecomponents.com; LCSC Part Number: C2909897
footprint Res-1206
pins: 1, 2

## ERJ-P06F3302V
designator R?, comment 33K
RES SMD 33 KOHM 1% 1/2W 0805; Manufacturer: Panasonic; Manufacturer Part Number: ERJ-P06F3302V; Value: 33kR; Temperature Coefficient: 100ppm/°C; Power Rating: 500mW; Voltage Rating: 150V; Item Type: Resistor; Supplier: Mouser; Supplier Part Number: 667-ERJ-P06F3302V; RoHS: Yes; Category: Chip SMD Resistors; Stock: 44370; Pricing: 1=0.15, 10=0.066, 50=0.066, 100=0.041, 1000=0.025, 10000=0.018 (USD); Mounting Technology: Surface Mount; Case/Package: 0805; Pins: 2; Contact Plating: Tin; Case Code (Imperial): 0805; Case Code (Metric): 2012; Weight: 0.000194oz; Min Operating Temperature: -55°C; Max Operating Temperature: 155°C; Tolerance: 1%; Resistor Type: Thick Film; Packaging: Tape and Reel; Termination: SMD/SMT; Voltage Rating (DC): 150V; Series: ERJ-P06; Resistance Tolerance: 1%; Technology: THICK FILM; Length: 2mm; Width: 1.2mm; Height: 0.6mm; Depth: 1.25mm; Reach SVHC Compliant: No; RoHS Compliant: Yes; ComponentLink1URL: https://datasheet.ciiva.com/11810/0900766b812cb812-11810302.pdf?src-supplier=Rs; ComponentLink1Description: https://datasheet.ciiva.com/11810/0900766b812cb812-11810302.pdf?src-supplier=Rs; ComponentLink2URL: https://datasheet.ciiva.com/48426/erjp-series-eng-tds-48426810.pdf?src-supplier=Distrelec; ComponentLink2Description: https://datasheet.ciiva.com/48426/erjp-series-eng-tds-48426810.pdf?src-supplier=Distrelec; ComponentLink3URL: https://datasheet.ciiva.com/6082/1801181-6082309.pdf?src-supplier=Farnell; ComponentLink3Description: https://datasheet.ciiva.com/6082/1801181-6082309.pdf?src-supplier=Farnell; ComponentLink4URL: https://datasheet.ciiva.com/7802/1790600-7802538.pdf?src-supplier=Element14; ComponentLink4Description: https://datasheet.ciiva.com/7802/1790600-7802538.pdf?src-supplier=Element14; ComponentLink5URL: https://datasheet.ciiva.com/6082/1801181-6082312.pdf?src-supplier=Farnell; ComponentLink5Description: https://datasheet.ciiva.com/6082/1801181-6082312.pdf?src-supplier=Farnell; ComponentLink6URL: https://datasheet.ciiva.com/7802/1790600-7802539.pdf?src-supplier=Element14; ComponentLink6Description: https://datasheet.ciiva.com/7802/1790600-7802539.pdf?src-supplier=Element14; LCSC Part Number: C441988
footprint RES-0805 (SMD 0805)
pins: 1, 2

## ESR03EZPJ103
designator R?, comment 10K
RES SMD 10K OHM 5% 1/4W 0603; Manufacturer: ROHM Semicon; Manufacturer Part Number: ESR03EZPJ103; Item Type: Resistor; Value: 10K; Package: 0603; ComponentLink1Description: LCSC; ComponentLink1URL: https://www.lcsc.com/product-detail/Chip-Resistor-Surface-Mount_ROHM-Semicon-ESR03EZPJ103_C253330.html; LCSC Part Number: C253330
footprint Res-0603
pins: 1, 2

## EWWR0006J390RT9
designator R?, comment 390R
Wirewound Resistors 390Ω 6W ±250ppm/℃ ±5% Plugin,D8xL23.5mm Through Hole Resistors ROHS; Manufacturer: RESI; Manufacturer Part Number: EWWR0006J390RT9; Package: Plugin,D8xL23.5mm; LCSC Part Number: C348979; Item Type: Resistor; ComponentLink1Description: LCSC; ComponentLink1URL: https://www.lcsc.com/product-detail/Through-Hole-Resistors_RESI-EWWR0006J390RT9_C348979.html
footprint EWWR0006J390RT9
pins: 1, 2

## EWWR0006J450RT9
designator R?, comment 450R
Wirewound Resistors 450Ω 6W ±250ppm/℃ ±5% Plugin,D8xL23.5mm Through Hole Resistors ROHS; Manufacturer: RESI; Manufacturer Part Number: EWWR0006J450RT9; Package: Plugin,D8xL23.5mm; LCSC Part Number: C348984; Item Type: Resistor; ComponentLink1Description: LCSC; ComponentLink1URL: https://www.lcsc.com/product-detail/Through-Hole-Resistors_RESI-EWWR0006J450RT9_C348984.html
footprint EWWR0006J450RT9
pins: 1, 2

## EWWR0006J500RT9
designator R?, comment 500R
Wirewound Resistors 500Ω 6W ±250ppm/℃ ±5% Plugin,D8xL23.5mm Through Hole Resistors ROHS; Manufacturer: RESI; Manufacturer Part Number: EWWR0006J500RT9; Package: Plugin,D8xL23.5mm; LCSC Part Number: C348990; Item Type: Resistor; ComponentLink1Description: LCSC; ComponentLink1URL: https://www.lcsc.com/product-detail/Through-Hole-Resistors_RESI-EWWR0006J500RT9_C348990.html
footprint EWWR0006J500RT9
pins: 1, 2

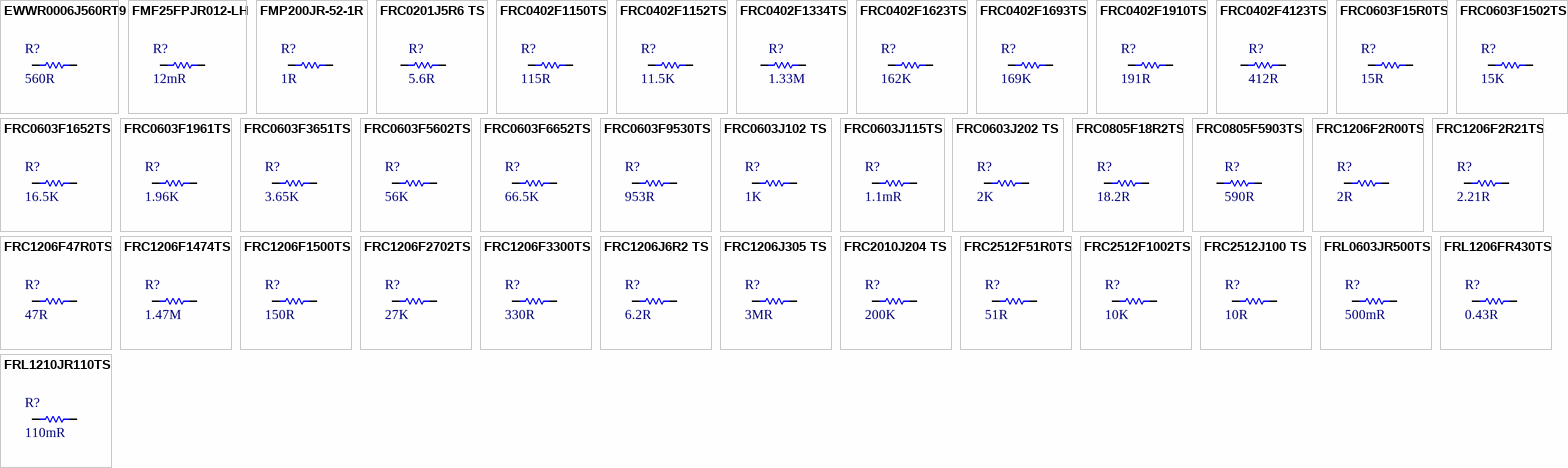
[diagram p8: symbols EWWR0006J560RT9 to FRL1210JR110TS]

## EWWR0006J560RT9
designator R?, comment 560R
Wirewound Resistors 560Ω 6W ±250ppm/℃ ±5% Plugin,D8xL23.5mm Through Hole Resistors ROHS; Manufacturer: RESI; Manufacturer Part Number: EWWR0006J560RT9; Package: Plugin,D8xL23.5mm; LCSC Part Number: C348992; Item Type: Resistor; ComponentLink1Description: LCSC; ComponentLink1URL: https://www.lcsc.com/product-detail/Through-Hole-Resistors_RESI-EWWR0006J560RT9_C348992.html
footprint EWWR0006J500RT9
pins: 1, 2

## FMF25FPJR012-LH
designator R?, comment 12mR
2W 12mΩ Current Sensing Resistors ±50ppm/℃ ±1% 2512 Current Sense Resistors / Shunt Resistors ROHS; Manufacturer: PSA(Prosperity Dielectrics); Manufacturer Part Number: FMF25FPJR012-LH; Package: 2512; LCSC Part Number: C2847460; Item Type: Resistor; ComponentLink1Description: LCSC; ComponentLink1URL: https://www.lcsc.com/product-detail/Current-Sense-Resistors-Shunt-Resistors_PSA-Prosperity-Dielectrics-FMF25FPJR012-LH_C2847460.html
footprint RES-2512
pins: 1, 2

## FMP200JR-52-1R
designator R?, comment 1R
RES 1 OHM 5% 2W AXIAL; Manufacturer: Yageo; Manufacturer Part Number: FMP200JR-52-1R; Item Type: Through-Hole Resistors; Supplier: Future Electronics; LCSC Part Number: C1741654; RoHS: Yes; Stock: 25000; Pricing: 2500=0.0318, 7500=0.031, 12500=0.0306, 25000=0.0301, 50000=0.0293 (USD); Case/Package: Axial; Min Operating Temperature: -55°C; Max Operating Temperature: 155°C; Value: 1R; Tolerance: 5%; Packaging: Cut Tape; Number of Terminations: 2; Max Power Dissipation: 2W; Series: FMP; Package Quantity: 1; Length: 0.354inch; RoHS Compliant: Yes; Lead Free: Lead Free; ComponentLink1URL: https://datasheet.ciiva.com/2711/yageolr-fmp-2013-2711444.pdf?src-supplier=Digikey; ComponentLink1Description: https://datasheet.ciiva.com/2711/yageolr-fmp-2013-2711444.pdf?src-supplier=Digikey; ComponentLink2URL: https://datasheet.ciiva.com/2711/yageolr-fmp-2013-2711445.pdf?src-supplier=Digikey; ComponentLink2Description: https://datasheet.ciiva.com/2711/yageolr-fmp-2013-2711445.pdf?src-supplier=Digikey
footprint FMP200JR-52-1R
pins: 1, 2

## FRC0201J5R6 TS
designator R?, comment 5.6R
50mW Thick Film Resistors ±5% 5.6Ω 0201 Chip Resistor - Surface Mount ROHS; Manufacturer: FOJAN; Manufacturer Part Number: FRC0201J5R6 TS; Package: 0201; LCSC Part Number: C18164348; Item Type: Resistor; ComponentLink1Description: LCSC; ComponentLink1URL: https://www.lcsc.com/product-detail/Chip-Resistor-Surface-Mount_FOJAN-FRC0201J5R6-TS_C18164348.html
footprint Res-0201
pins: 1, 2

## FRC0402F1150TS
designator R?, comment 115R
62.5mW Thick Film Resistors ±1% 100ppm/℃ 115Ω 0402 Chip Resistor - Surface Mount ROHS; Manufacturer: FOJAN; Manufacturer Part Number: FRC0402F1150TS; Package: 0402; LCSC Part Number: C7467414; Item Type: Resistor; ComponentLink1Description: LCSC; ComponentLink1URL: https://www.lcsc.com/product-detail/Chip-Resistor-Surface-Mount_FOJAN-FRC0402F1150TS_C7467414.html
footprint Res-0402
pins: 1, 2

## FRC0402F1152TS
designator R?, comment 11.5K
11.5kΩ 50V 62.5mW Thick Film Resistors ±100ppm/℃ ±1%  0402 Chip Resistor - Surface Mount ROHS; Manufacturer: FOJAN; Manufacturer Part Number: FRC0402F1152TS; Package: 0402; LCSC Part Number: C2933068; Item Type: Resistor; ComponentLink1Description: LCSC; ComponentLink1URL: https://www.lcsc.com/product-detail/Chip-Resistor-Surface-Mount_FOJAN-FRC0402F1152TS_C2933068.html
footprint Res-0402
pins: 1, 2

## FRC0402F1334TS
designator R?, comment 1.33M
62.5mW Thick Film Resistors 50V ±100ppm/℃ ±1% 1.33MΩ 0402 Chip Resistor - Surface Mount ROHS; Manufacturer: FOJAN; Manufacturer Part Number: FRC0402F1334TS; Package: 0402; Item Type: Resistor; LCSC Part Number: C5713265; ComponentLink1Description: LCSC; ComponentLink1URL: https://www.lcsc.com/product-detail/Chip-Resistor-Surface-Mount_FOJAN-FRC0402F1334TS_C5713265.html
footprint Res-0402
pins: 1, 2

## FRC0402F1623TS
designator R?, comment 162K
1/16W Thick Film Resistors 50V ±100ppm/℃ ±1% 162kΩ 0402 Chip Resistor - Surface Mount ROHS; Manufacturer: FOJAN; Manufacturer Part Number: FRC0402F1623TS; Package: 0402; LCSC Part Number: C2998128; Item Type: Resistor; ComponentLink1Description: LCSC; ComponentLink1URL: https://www.lcsc.com/product-detail/Chip-Resistor-Surface-Mount_FOJAN-FRC0402F1623TS_C2998128.html?s_z=n_CRCW0402162KFKED
footprint Res-0402
pins: 1, 2

## FRC0402F1693TS
designator R?, comment 169K
169kΩ 62.5mW Thick Film Resistors 50V ±100ppm/℃ ±1% 0402 Chip Resistor - Surface Mount ROHS; Manufacturer: FOJAN; Manufacturer Part Number: FRC0402F1693TS; Package: 0402; LCSC Part Number: C2974012; Item Type: Resistor; ComponentLink1Description: LCSC; ComponentLink1URL: https://www.lcsc.com/product-detail/Chip-Resistor-Surface-Mount_FOJAN-FRC0402F1693TS_C2974012.html
footprint Res-0402
pins: 1, 2

## FRC0402F1910TS
designator R?, comment 191R
62.5mW Thick Film Resistors ±100ppm/℃ ±1% 191Ω 0402 Chip Resistor - Surface Mount ROHS; Manufacturer: FOJAN; Manufacturer Part Number: FRC0402F1910TS; Package: 0402; LCSC Part Number: C5126203; Item Type: Resistor; ComponentLink1Description: LCSC; ComponentLink1URL: https://www.lcsc.com/product-detail/Chip-Resistor-Surface-Mount_FOJAN-FRC0402F1910TS_C5126203.html
footprint Res-0402
pins: 1, 2

## FRC0402F4123TS
designator R?, comment 412R
62.5mW Thick Film Resistors 50V ±100ppm/℃ ±1% 412kΩ 0402 Chip Resistor - Surface Mount ROHS; Manufacturer: FOJAN; Manufacturer Part Number: FRC0402F4123TS; Package: 0402; Item Type: Resistor; LCSC Part Number: C5126037
footprint Res-0402
pins: 1, 2

## FRC0603F15R0TS
designator R?, comment 15R
100mW Thick Film Resistors 75V ±100ppm/℃ ±1% 15Ω 0603 Chip Resistor - Surface Mount ROHS; Manufacturer: FOJAN; Manufacturer Part Number: FRC0603F15R0TS; Package: 0603; LCSC Part Number: C2906996; Item Type: Resistor; ComponentLink1Description: LCSC; ComponentLink1URL: https://www.lcsc.com/product-detail/Chip-Resistor-Surface-Mount_FOJAN-FRC0603F15R0TS_C2906996.html
footprint Res-0603
pins: 1, 2

## FRC0603F1502TS
designator R?, comment 15K
100mW Thick Film Resistors 75V ±100ppm/℃ ±1% 15kΩ 0603 Chip Resistor - Surface Mount ROHS; Manufacturer: FOJAN; Manufacturer Part Number: FRC0603F1502TS; Package: 0603; ComponentLink1Description: LCSC; ComponentLink1URL: https://www.lcsc.com/product-detail/Chip-Resistor-Surface-Mount_FOJAN-FRC0603F1502TS_C2906995.html; LCSC Part Number: C2906995; Item Type: Resistor
footprint RES-0603
pins: 1, 2

## FRC0603F1652TS
designator R?, comment 16.5K
100mW Thick Film Resistors 75V ±100ppm/℃ ±1% 16.5kΩ 0603 Chip Resistor - Surface Mount ROHS; Manufacturer: FOJAN; Manufacturer Part Number: FRC0603F1652TS; Package: 0603; LCSC Part Number: C2933155; Item Type: Resistor; ComponentLink1Description: LCSC; ComponentLink1URL: https://www.lcsc.com/product-detail/Chip-Resistor-Surface-Mount_FOJAN-FRC0603F1652TS_C2933155.html
footprint Res-0603
pins: 1, 2

## FRC0603F1961TS
designator R?, comment 1.96K
100mW Thick Film Resistors 75V ±100ppm/℃ ±1% 1.96kΩ 0603 Chip Resistor - Surface Mount ROHS; Manufacturer: FOJAN; Manufacturer Part Number: FRC0603F1961TS; Package: 0603; LCSC Part Number: C2998107; Item Type: Resistor; ComponentLink1Description: LCSC; ComponentLink1URL: https://www.lcsc.com/product-detail/Chip-Resistor-Surface-Mount_FOJAN-FRC0603F1961TS_C2998107.html
footprint Res-0603
pins: 1, 2